# Altium footprint library Footprints.PcbLib: 320 footprints (part 7 of 20)
Each footprint in its own frame and in the unit in brackets; x right, y up, seen from the top. Pads: shape width x height; smd on the part's side, far side on the other; paste and mask are expansions set on the pad; w line width, h text height; cw(c..) or ccw(c..) is an arc to the next point about the centre after c.
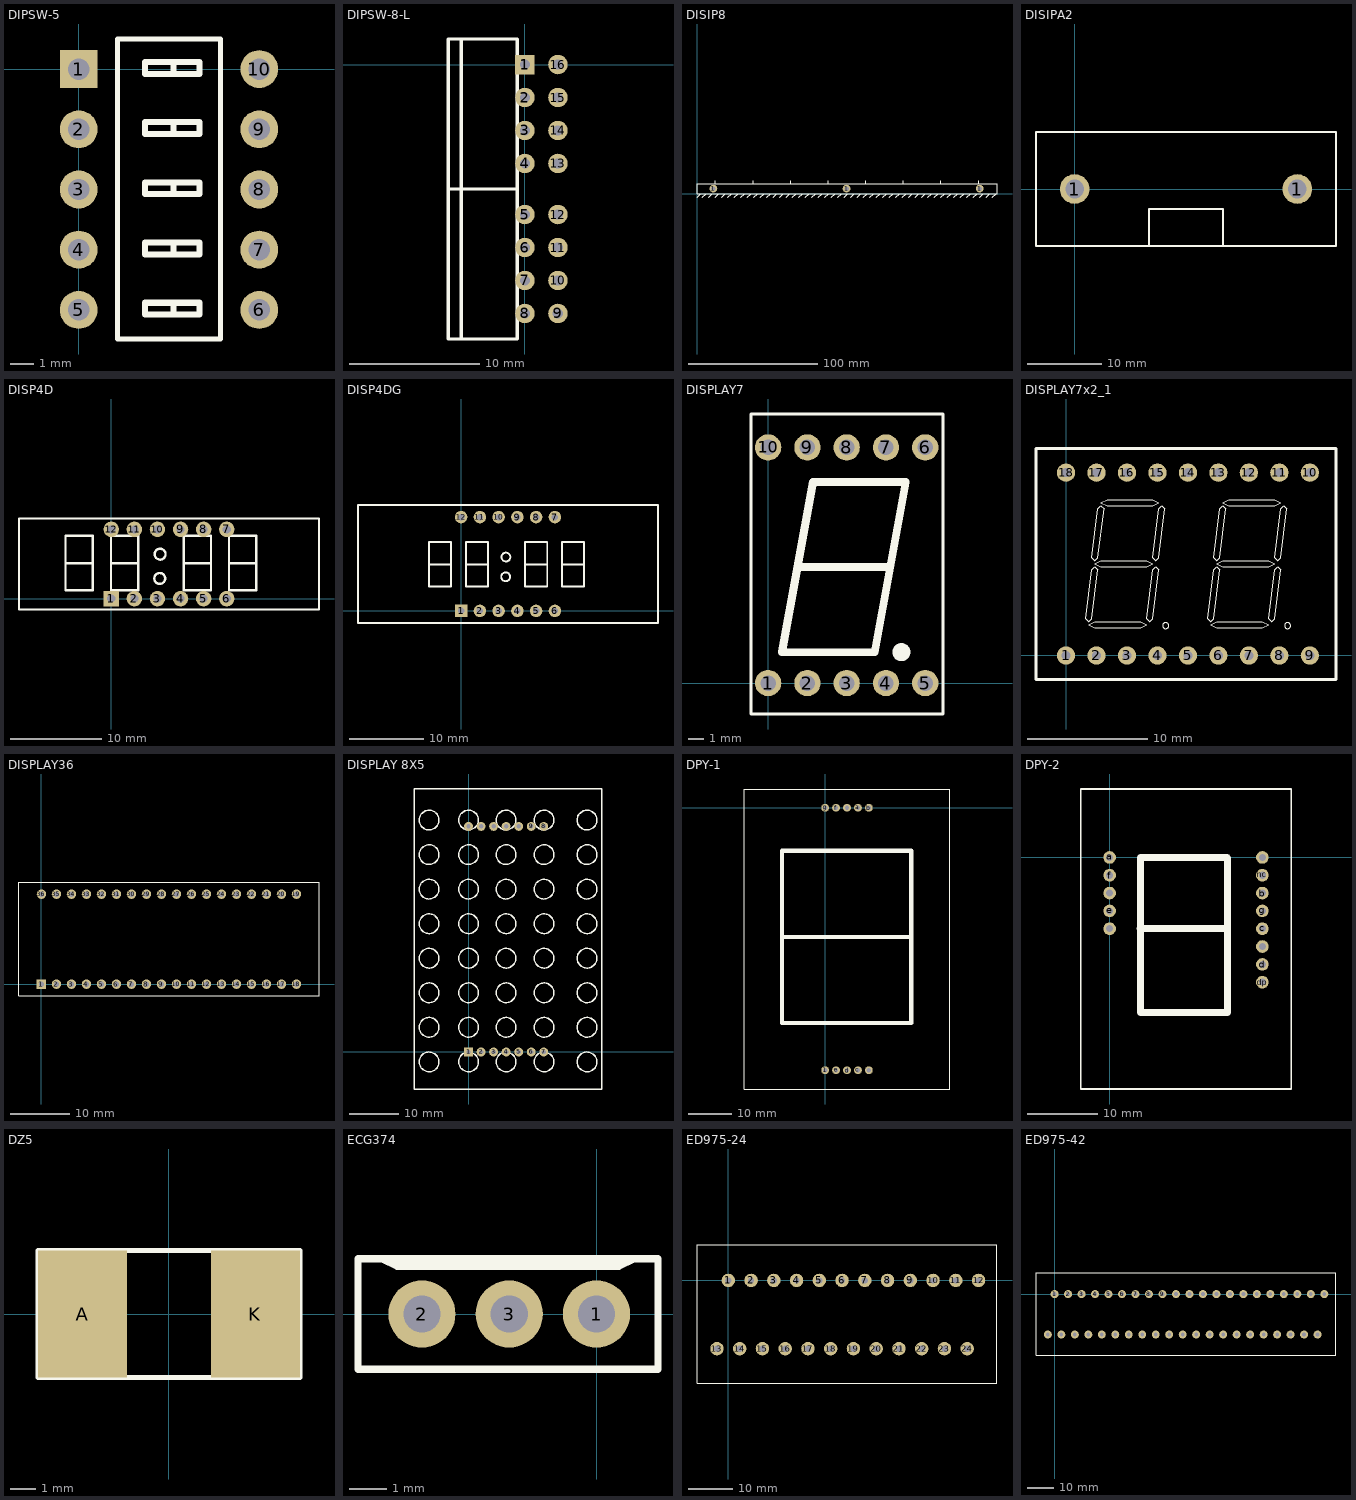
[diagram p6: the footprints below, top view; thin cyan lines are the x and y axes]

## DIPSW-5 [mm]
pads (10):
  rect 1.6x1.6 hole 0.9: 1(0,0)
  round 1.6 hole 0.9: 2(0,-2.54) 3(0,-5.08) 4(0,-7.62) 5(0,-10.16) 6(7.62,-10.16) 7(7.62,-7.62) 8(7.62,-5.08) 9(7.62,-2.54) 10(7.62,0)
Top Overlay:
  lines w0.2: 1.635,-11.39 1.635,1.27 5.985,1.27 5.985,-11.39 1.635,-11.39
  lines w0.254: 4,-10.26 4,-9.86 ; 4,-7.72 4,-7.32 ; 4,-5.28 4,-4.78 ; 4,-2.74 4,-2.24 ; 4,-0.2 4,0.3 ; 2.8,-10.36 2.8,-9.86 5.1,-9.86 5.1,-10.36 2.8,-10.36 ; 2.8,-7.82 2.8,-7.32 5.1,-7.32 5.1,-7.82 2.8,-7.82 ; 2.8,-5.28 2.8,-4.78 5.1,-4.78 5.1,-5.28 2.8,-5.28 ; 2.8,-2.74 2.8,-2.24 5.1,-2.24 5.1,-2.74 2.8,-2.74 ; 2.8,-0.2 2.8,0.3 5.1,0.3 5.1,-0.2 2.8,-0.2

## DIPSW-8-L [mm]
pads (16):
  rect 1.5x1.5 hole 0.8: 1(0,0)
  round 1.5 hole 0.8: 2(0,-2.54) 3(0,-5.08) 4(0,-7.62) 5(0,-11.55) 6(0,-14.09) 7(0,-16.63) 8(0,-19.17) 9(2.54,-19.17) 10(2.54,-16.63) 11(2.54,-14.09) 12(2.54,-11.55) 13(2.54,-7.62) 14(2.54,-5.08) 15(2.54,-2.54) 16(2.54,0)
Top Overlay:
  lines w0.254: -4.9,-21.135 -4.9,1.965 ; -5.9,-9.585 -5.9,-21.135 -0.6,-21.135 -0.6,-9.585 ; -5.9,-9.585 -5.9,1.965 -0.6,1.965 -0.6,-9.585 ; -5.9,-9.585 -0.6,-9.585

## DISIP8 [mm]
pads (3):
  round 6 hole 3.5: 1(12.7,3.81) 1(115.88,3.81) 1(219.075,3.81)
Top Overlay:
  lines w0.254: 0,-3 3,0 ; 4,-3 7,0 ; 9,-3 12,0 ; 14,-3 17,0 ; 14.287,7.62 14.287,10 ; 19,-3 22,0 ; 24,-3 27,0 ; 29,-3 32,0 ; 34,-3 37,0 ; 39,-3 42,0 ; 43.419,7.62 43.419,10 ; 44,-3 47,0 ; 49,-3 52,0 ; 54,-3 57,0 ; 59,-3 62,0 ; 64,-3 67,0 ; 69,-3 72,0 ; 72.552,7.62 72.552,10 ; 74,-3 77,0 ; 79,-3 82,0 ; 84,-3 87,0 ; 89,-3 92,0 ; 94,-3 97,0 ; 99,-3 102,0 ; 101.683,7.62 101.683,10 ; 104,-3 107,0 ; 109,-3 112,0 ; 114,-3 117,0 ; 119,-3 122,0 ; 124,-3 127,0 ; 129,-3 132,0 ; 130.815,7.62 130.815,10 ; 134,-3 137,0 ; 139,-3 142,0 ; 144,-3 147,0 ; 149,-3 152,0 ; 154,-3 157,0 ; 159,-3 162,0 ; 159.947,7.62 159.947,10 ; 164,-3 167,0 ; 169,-3 172,0 ; 174,-3 177,0 ; 179,-3 182,0 ; 184,-3 187,0 ; 189,-3 192,0 ; 189.079,7.62 189.079,10 ; 194,-3 197,0 ; 199,-3 202,0 ; 204,-3 207,0 ; 209,-3 212,0 ; 214,-3 217,0 ; 218.212,7.62 218.212,10 ; 219,-3 222,0 ; 224,-3 227,0 ; 229,-3 232,0 ; 0,0 232.5,0 232.5,7.62 0,7.62 0,0

## DISIPA2 [mm]
pads (2):
  round 4 hole 2.5: 1(0,0) 1(30,0)
Top Overlay:
  lines w0.254: 10,-7.7 10,-2.7 20,-2.7 20,-7.7 ; -5.2,-7.7 35.2,-7.7 35.2,7.7 -5.2,7.7 -5.2,-7.7

## DISP4D [mm]
pads (12):
  rect 1.7x1.7 hole 0.9: 1(0,0)
  round 1.7 hole 0.9: 2(2.54,0) 3(5.08,0) 4(7.62,0) 5(10.16,0) 6(12.7,0) 7(12.7,7.62) 8(10.16,7.62) 9(7.62,7.62) 10(5.08,7.62) 11(2.54,7.62) 12(0,7.62)
Top Overlay:
  circle w0.254: c5.37,4.89 r0.6
  circle w0.254: c5.33,2.22 r0.6
  lines w0.254: -5.02,3.9 -2.23,3.9 ; -0.02,3.9 2.77,3.9 ; 7.98,3.9 10.77,3.9 ; 12.98,3.9 15.77,3.9 ; -10.15,-1.19 -10.15,8.81 22.85,8.81 22.85,-1.19 -10.15,-1.19 ; -5.04,0.91 -2.04,0.91 -2.04,6.91 -2.05,6.92 -5.04,6.92 -5.04,0.91 ; -0.04,0.91 2.96,0.91 2.96,6.91 2.95,6.92 -0.04,6.92 -0.04,0.91 ; 7.96,0.91 10.96,0.91 10.96,6.91 10.95,6.92 7.96,6.92 7.96,0.91 ; 12.96,0.91 15.96,0.91 15.96,6.91 15.95,6.92 12.96,6.92 12.96,0.91

## DISP4DG [mm]
pads (12):
  rect 1.7x1.7 hole 0.9: 1(0,0)
  round 1.7 hole 0.9: 2(2.54,0) 3(5.08,0) 4(7.62,0) 5(10.16,0) 6(12.7,0) 7(12.7,12.7) 8(10.16,12.7) 9(7.62,12.7) 10(5.08,12.7) 11(2.54,12.7) 12(0,12.7)
Top Overlay:
  circle w0.254: c6.03,4.62 r0.6
  circle w0.254: c6.07,7.29 r0.6
  lines w0.254: -4.32,6.3 -1.53,6.3 ; 0.68,6.3 3.47,6.3 ; 3.65,9.32 0.66,9.32 0.66,3.31 3.66,3.31 3.66,9.31 ; 8.68,6.3 11.47,6.3 ; 11.65,9.32 8.66,9.32 8.66,3.31 11.66,3.31 11.66,9.31 ; 13.68,6.3 16.47,6.3 ; 16.65,9.32 13.66,9.32 13.66,3.31 16.66,3.31 16.66,9.31 ; -13.95,-1.65 -13.95,14.35 26.65,14.35 26.65,-1.65 -13.95,-1.65 ; -4.34,3.31 -4.34,9.32 -1.35,9.32 -1.34,9.31 -1.34,3.31 -4.34,3.31

## DISPLAY7 [mm]
pads (10):
  round 1.7 hole 1: 1(0,0) 2(2.54,0) 3(5.08,0) 4(7.62,0) 5(10.16,0) 6(10.16,15.24) 7(7.62,15.24) 8(5.08,15.24) 9(2.54,15.24) 10(0,15.24)
Top Overlay:
  circle w0.6: c8.617,2 r0.283
  lines w0.2: -1.1,-2 11.3,-2 11.3,17.4 -1.1,17.4 -1.1,-2
  lines w0.5: 1.9,7.5 7.9,7.5 ; 1.9,7.5 2.9,13 8.9,13 7.9,7.5 ; 1.9,7.5 0.9,2 6.9,2 7.9,7.5

## DISPLAY7x2_1 [mil]
height 314.96
pads (18):
  round 60 hole 30: 1(0,0) 2(100,0) 3(200,0) 4(300,0) 5(400,0) 6(500,0) 7(600,0) 8(700,0) 9(800,0) 10(800,600) 11(700,600) 12(600,600) 13(500,600) 14(400,600) 15(300,600) 16(200,600) 17(100,600) 18(0,600)
Top Overlay:
  drawing of 160 lines, arcs and shapes, not listed
3D body "SW3dPS-Disp_SA56-11.STEP": height 316.25, standoff -156.19, extent -100,-75 400,675
3D body "SW3dPS-Disp_SA56-11.STEP": height 316.25, standoff -156.19, extent 387.8,-74.8 887.8,675.2

## DISPLAY36 [mm]
pads (36):
  rect 1.6x1.6 hole 0.9: 1(0,0)
  round 1.6 hole 0.9: 2(2.54,0) 3(5.08,0) 4(7.62,0) 5(10.16,0) 6(12.7,0) 7(15.24,0) 8(17.78,0) 9(20.32,0) 10(22.86,0) 11(25.4,0) 12(27.94,0) 13(30.48,0) 14(33.02,0) 15(35.56,0) 16(38.1,0) 17(40.64,0) 18(43.18,0) 19(43.18,15.24) 20(40.64,15.24) 21(38.1,15.24) 22(35.56,15.24) 23(33.02,15.24) 24(30.48,15.24) 25(27.94,15.24) 26(25.4,15.24) 27(22.86,15.24) 28(20.32,15.24) 29(17.78,15.24) 30(15.24,15.24) 31(12.7,15.24) 32(10.16,15.24) 33(7.62,15.24) 34(5.08,15.24) 35(2.54,15.24) 36(0,15.24)
Top Overlay:
  lines w0.2: -3.8,-2 47,-2 47,17.3 -3.8,17.3 -3.8,-2

## DISPLAY 8X5 [mm]
pads (14):
  rect 1.8x1.8 hole 0.9: 1(0,0)
  round 1.8 hole 0.9: 2(2.54,0) 3(5.08,0) 4(7.62,0) 5(10.16,0) 6(12.7,0) 7(15.24,0) 8(15.24,45.72) 9(12.7,45.72) 10(10.16,45.72) 11(7.62,45.72) 12(5.08,45.72) 13(2.54,45.72) 14(0,45.72)
Top Overlay:
  circle w0.254: c-8,-2 r2
  circle w0.254: c24,-2 r2
  circle w0.254: c7.6,-2 r2
  circle w0.254: c0,-2 r2
  circle w0.254: c15.3,-2 r2
  circle w0.254: c-8,5 r2
  circle w0.254: c24,5 r2
  circle w0.254: c7.6,5 r2
  circle w0.254: c0,5 r2
  circle w0.254: c15.3,5 r2
  circle w0.254: c-8,12 r2
  circle w0.254: c24,12 r2
  circle w0.254: c7.6,12 r2
  circle w0.254: c0,12 r2
  circle w0.254: c15.3,12 r2
  circle w0.254: c-8,19 r2
  circle w0.254: c24,19 r2
  circle w0.254: c7.6,19 r2
  circle w0.254: c0,19 r2
  circle w0.254: c15.3,19 r2
  circle w0.254: c-8,26 r2
  circle w0.254: c24,26 r2
  circle w0.254: c7.6,26 r2
  circle w0.254: c0,26 r2
  circle w0.254: c15.3,26 r2
  circle w0.254: c-8,33 r2
  circle w0.254: c24,33 r2
  circle w0.254: c7.6,33 r2
  circle w0.254: c0,33 r2
  circle w0.254: c15.3,33 r2
  circle w0.254: c-8,40 r2
  circle w0.254: c24,40 r2
  circle w0.254: c7.6,40 r2
  circle w0.254: c0,40 r2
  circle w0.254: c15.3,40 r2
  circle w0.254: c-8,47 r2
  circle w0.254: c24,47 r2
  circle w0.254: c7.6,47 r2
  circle w0.254: c0,47 r2
  circle w0.254: c15.3,47 r2
  lines w0.254: -11,-7.5 27,-7.5 27,53.3 -11,53.3 -11,-7.5

## DPY-1 [mm]
pads (10):
  round 1.8 hole 1: 1(0,-60.96) a(7.62,0) b(10.16,0) c(7.62,-60.96) com(10.16,-60.96) d(5.08,-60.96) dp(5.08,0) e(2.54,-60.96) f(2.54,0) g(0,0)
Top Overlay:
  lines w0.254: -18.77,-65.33 28.93,-65.33 28.93,4.37 -18.77,4.37 -18.77,-65.33
  lines w1: -9.98,-30 20,-30 ; -10,-50 -10,-10 20,-10 20,-50 -10,-50

## DPY-2 [mm]
pads (13):
  round 1.8 hole 1: a(0,0) b(21.75,-5.08) c(21.75,-10.16) com(0,-10.16) com(0,-5.08) com(21.75,-12.7) com(21.75,0) d(21.75,-15.24) dp(21.75,-17.78) e(0,-7.62) f(0,-2.54) g(21.75,-7.62) nc(21.75,-2.54)
Top Overlay:
  lines w0.254: -4.125,-33 25.875,-33 25.875,9.75 -4.125,9.75 -4.125,-33
  lines w1: 4.32,-10.11 16.56,-10.11 16.64,-10.19 ; 4.4,-22.13 16.79,-22.13 16.79,-0.06 16.71,0.02 4.4,0.02 4.4,-22.13

## DZ5 [mm]
pads (2):
  rect 3.5x5 smd: A(-3.4,0) K(3.4,0)
Top Overlay:
  lines w0.2: -5.15,-2.5 5.15,-2.5 5.15,2.5 -5.15,2.5 -5.15,0 -5.15,-2.5

## ECG374 [mm]
pads (3):
  round 1.8 hole 1: 1(0,0) 2(-4.68,0) 3(-2.34,0)
Top Overlay:
  lines w0.2: -5.759,1.482 -5.336,1.282 0.59,1.282 1.014,1.482 ; -6.394,-1.482 -6.394,1.482 1.649,1.482 1.649,-1.482 -6.394,-1.482

## ED975-24 [mm]
pads (24):
  round 3 hole 1.4: 1(0,0) 2(5.08,0) 3(10.16,0) 4(15.24,0) 5(20.32,0) 6(25.4,0) 7(30.48,0) 8(35.56,0) 9(40.64,0) 10(45.72,0) 11(50.8,0) 12(55.88,0) 13(-2.54,-15.24) 14(2.54,-15.24) 15(7.62,-15.24) 16(12.7,-15.24) 17(17.78,-15.24) 18(22.86,-15.24) 19(27.94,-15.24) 20(33.02,-15.24) 21(38.1,-15.24) 22(43.18,-15.24) 23(48.26,-15.24) 24(53.34,-15.24)
Top Overlay:
  lines w0.254: -7,-23 -7,8 60,8 60,-23 -7,-23

## ED975-42 [mm]
pads (42):
  round 3 hole 1.4: 1(0,0) 2(5.08,0) 3(10.16,0) 4(15.24,0) 5(20.32,0) 6(25.4,0) 7(30.48,0) 8(35.56,0) 9(40.64,0) 10(45.72,0) 11(50.8,0) 12(55.88,0) 13(60.96,0) 14(66.04,0) 15(71.12,0) 16(76.2,0) 17(81.28,0) 18(86.36,0) 19(91.44,0) 20(96.52,0) 21(101.6,0) 22(-2.54,-15.24) 23(2.54,-15.24) 24(7.62,-15.24) 25(12.7,-15.24) 26(17.78,-15.24) 27(22.86,-15.24) 28(27.94,-15.24) 29(33.02,-15.24) 30(38.1,-15.24) 31(43.18,-15.24) 32(48.26,-15.24) 33(53.34,-15.24) 34(58.42,-15.24) 35(63.5,-15.24) 36(68.58,-15.24) 37(73.66,-15.24) 38(78.74,-15.24) 39(83.82,-15.24) 40(88.9,-15.24) 41(93.98,-15.24) 42(99.06,-15.24)
Top Overlay:
  lines w0.254: -7,-23 106,-23 106,8 -7,8 -7,-23